# Altium schematic symbol library AltiumTaskLib.SchLib: 9 symbols
Pins are listed as number, name and electrical type; pins without a type are passive.

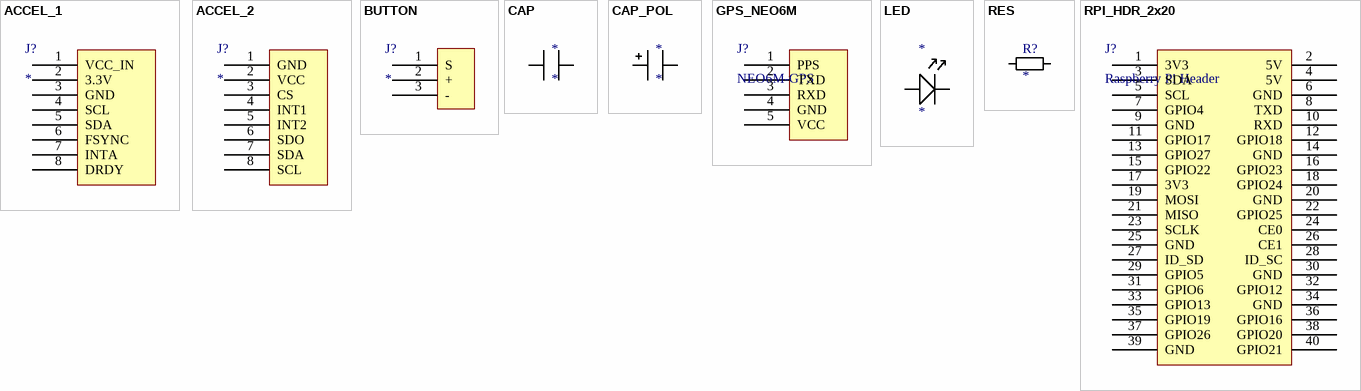
[diagram p0: symbols ACCEL_1 to RPI_HDR_2x20]

## ACCEL_1
designator J?
footprint HDR_1x8_1MOUNT (HW-290)
pins: 1 VCC_IN, 2 3.3V, 3 GND, 4 SCL, 5 SDA, 6 FSYNC, 7 INTA, 8 DRDY

## ACCEL_2
designator J?
footprint HDR_1x8_2MOUNT (ADXL345)
pins: 1 GND, 2 VCC, 3 CS, 4 INT1, 5 INT2, 6 SDO, 7 SDA, 8 SCL

## BUTTON
designator J?
footprint HDR_1X3
pins: 1 S, 2 +, 3 -

## CAP
designator *
footprint CAP
pins: 1, 2

## CAP_POL
designator *
footprint CAPACITOR_POL
footprint CAP_POL_SMALL
pins: 1   , 2 +

## GPS_NEO6M
designator J?, comment NEO6M-GPS
footprint HDR_1x5 (GNSS module)
pins: 1 PPS, 2 TXD, 3 RXD, 4 GND, 5 VCC

## LED
designator *
footprint LED_5MM
pins: 1 A, 2 K

## RES
designator R?
footprint RESISTOR_AXIAL_400
pins: 1, 2

## RPI_HDR_2x20
designator J?, comment Raspberry Pi Header
footprint HDR_2x20_2.54_BOTTOM (Raspberry Pi 5)
pins: 1 3V3, 2 5V, 3 SDA, 4 5V, 5 SCL, 6 GND, 7 GPIO4, 8 TXD, 9 GND, 10 RXD, 11 GPIO17, 12 GPIO18, 13 GPIO27, 14 GND, 15 GPIO22, 16 GPIO23, 17 3V3, 18 GPIO24, 19 MOSI, 20 GND, 21 MISO, 22 GPIO25, 23 SCLK, 24 CE0, 25 GND, 26 CE1, 27 ID_SD, 28 ID_SC, 29 GPIO5, 30 GND, 31 GPIO6, 32 GPIO12, 33 GPIO13, 34 GND, 35 GPIO19, 36 GPIO16, 37 GPIO26, 38 GPIO20, 39 GND, 40 GPIO21